# Altium footprint library Game_Controller.PcbLib: 19 footprints (part 1 of 2)
Each footprint in its own frame and in the unit in brackets; x right, y up, seen from the top. Pads: shape width x height; smd on the part's side, far side on the other; paste and mask are expansions set on the pad; w line width, h text height; cw(c..) or ccw(c..) is an arc to the next point about the centre after c.
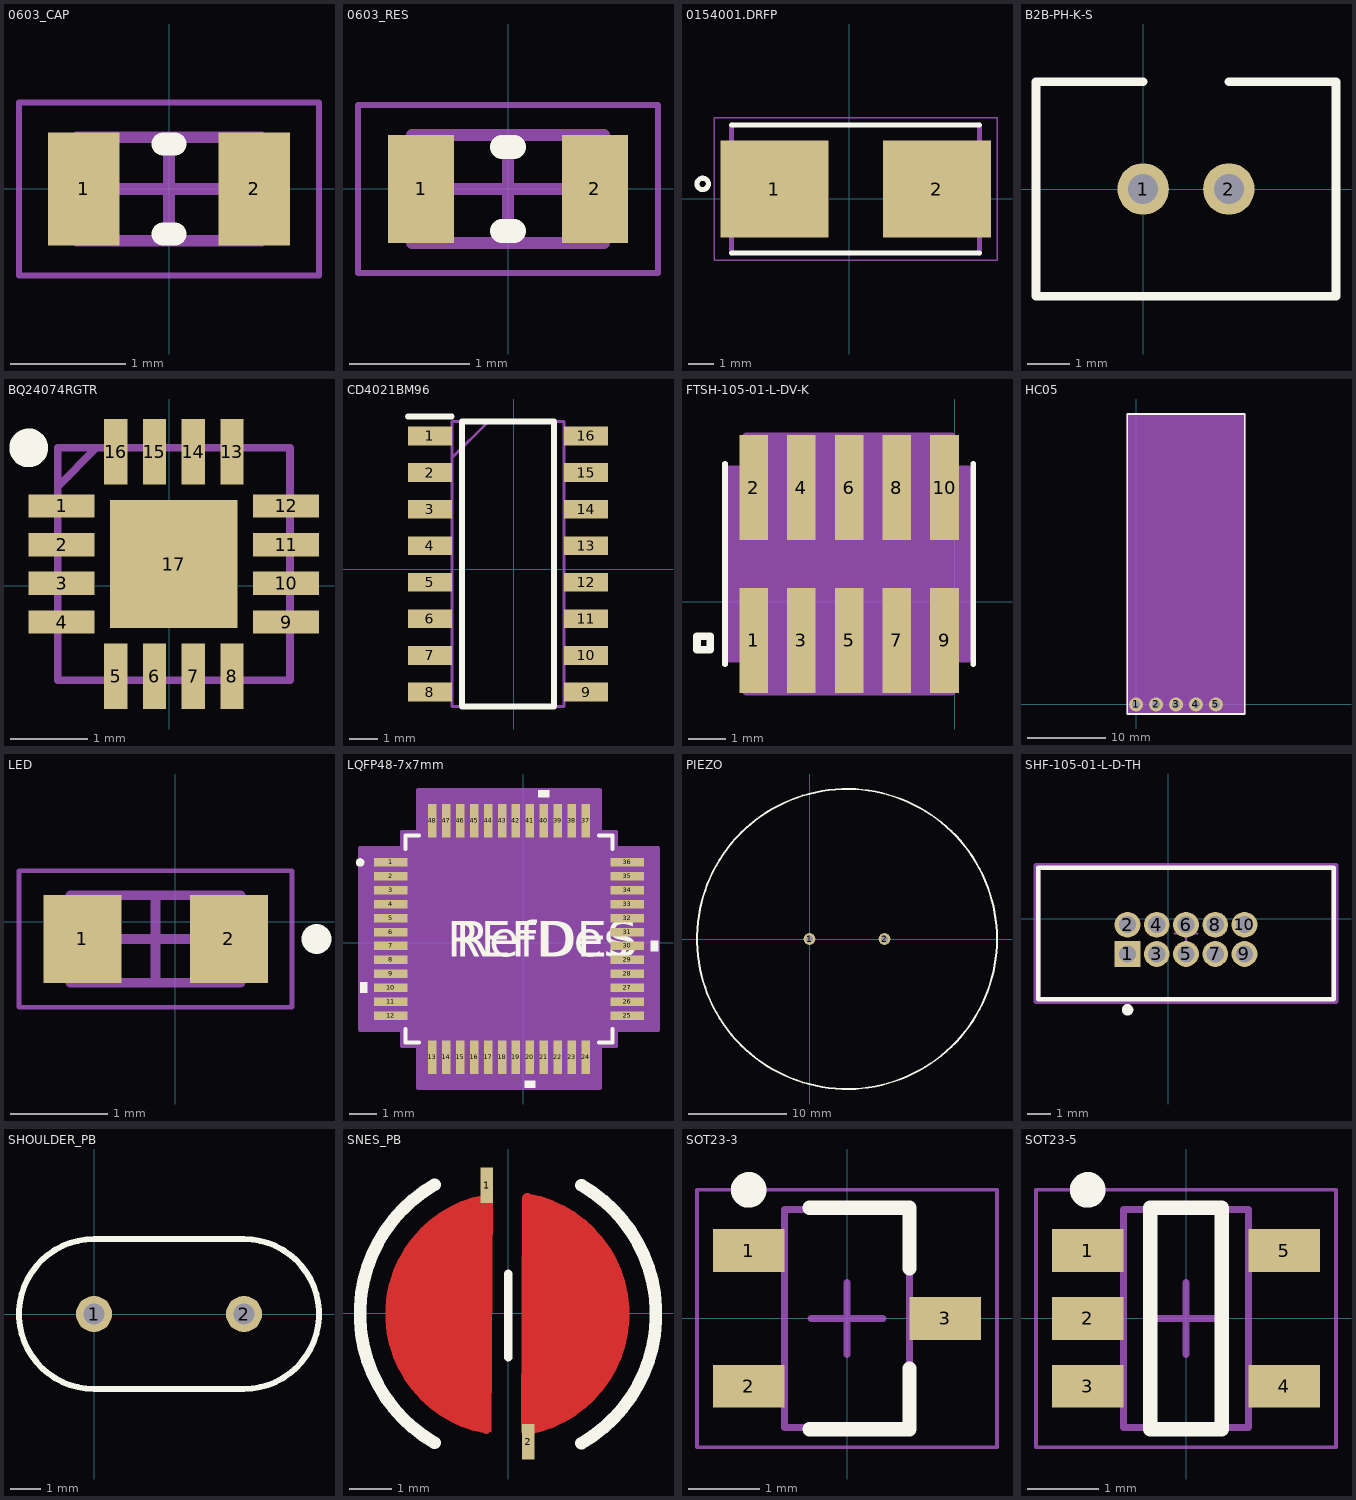
[diagram p0: the footprints below, top view; thin cyan lines are the x and y axes]

## 0603_CAP [mm] "Chip Capacitor, 2-Leads, Body 1.55x0.85mm, IPC Medium Density"
height 0.55
pads (2):
  rect 0.62x0.98 smd: 1(-0.74,0) 2(0.74,0)
Top Overlay:
  lines w0.2: -0.05,-0.39 0.05,-0.39 ; -0.05,0.39 0.05,0.39
Mechanical 13:
  lines w0.1: -0.8,-0.45 0.8,-0.45 0.8,0.45 -0.8,0.45 -0.8,-0.45
Mechanical 15:
  lines w0.05: -1.3,-0.75 1.3,-0.75 1.3,0.75 -1.3,0.75 -1.3,-0.75
  lines w0.1: -0.45,0 0.45,0 ; 0,-0.45 0,0.45
3D body: height 0.55, standoff 0, extent 0.6,-0.45 0.8,0.45
3D body: height 0.55, standoff 0, extent -0.8,-0.45 -0.6,0.45
3D body: height 0.55, standoff 0, extent -0.6,-0.45 0.6,0.45

## 0603_RES [mm] "Chip Resistor, 2-Leads, Body 1.55x0.85mm, IPC Medium Density"
height 0.55
pads (2):
  rect 0.55x0.9 smd: 1(-0.725,0) 2(0.725,0)
Top Overlay:
  lines w0.2: -0.05,-0.35 0.05,-0.35 ; -0.05,0.35 0.05,0.35
Mechanical 13:
  lines w0.1: -0.8,-0.45 0.8,-0.45 0.8,0.45 -0.8,0.45 -0.8,-0.45
Mechanical 15:
  lines w0.05: -1.25,-0.7 1.25,-0.7 1.25,0.7 -1.25,0.7 -1.25,-0.7
  lines w0.1: -0.45,0 0.45,0 ; 0,-0.45 0,0.45
3D body: height 0.55, standoff 0, extent 0.6,-0.45 0.8,0.45
3D body: height 0.55, standoff 0, extent -0.8,-0.45 -0.6,0.45
3D body: height 0.55, standoff 0, extent -0.6,-0.45 0.6,0.45

## 0154001.DRFP [mm]
pads (2):
  rect 4.24x3.81 smd: 1(-2.936,0.381) 2(3.444,0.381)
Top Overlay:
  circle w0.2: c-5.746,0.581 r0.224
  lines w0.2: -4.609,-2.134 5.117,-2.134 ; -4.609,2.896 5.117,2.896
Mechanical 13:
  lines w0.2: -4.609,-2.134 -4.609,2.896 ; 5.117,-2.134 5.117,2.896
Mechanical 15:
  lines w0.05: -5.296,-2.419 5.804,-2.419 5.804,3.181 -5.296,3.181 -5.296,-2.419
3D body "0154004.DR--3DModel-STEP-56544.STEP": height 3.81, standoff 0, extent -4.611,-2.134 5.119,2.896

## B2B-PH-K-S [mm]
pads (2):
  round 1.2 hole 0.7: 1(0,0) 2(2,0)
Top Overlay:
  lines w0.2: 0,2.5 -2.5,2.5 -2.5,-2.5 0,-2.5 2,-2.5 4.5,-2.5 4.5,2.5 2,2.5

## BQ24074RGTR [mm]
pads (17):
  rect 0.85x0.3 smd: 1(-1.389,1.033) 2(-1.389,0.533) 3(-1.389,0.033) 4(-1.389,-0.467) 9(1.511,-0.467) 10(1.511,0.033) 11(1.511,0.533) 12(1.511,1.033)
  rect 0.3x0.85 smd: 5(-0.689,-1.167) 6(-0.189,-1.167) 7(0.311,-1.167) 8(0.811,-1.167) 13(0.811,1.733) 14(0.311,1.733) 15(-0.189,1.733) 16(-0.689,1.733)
  rect 1.65x1.65 smd: 17(0.061,0.283)
Top Overlay:
  circle w0.25: c-1.814,1.783 r0.125
Mechanical 15:
  lines w0.1: -1.439,1.283 -0.939,1.783 ; -1.439,-1.217 -1.439,1.783 1.561,1.783 1.561,-1.217 -1.439,-1.217

## CD4021BM96 [mm]
pads (16):
  rect 1.525x0.65 smd: 1(-2.915,4.631) 2(-2.915,3.361) 3(-2.915,2.091) 4(-2.915,0.821) 5(-2.915,-0.449) 6(-2.915,-1.719) 7(-2.915,-2.989) 8(-2.915,-4.259) 9(2.509,-4.259) 10(2.509,-2.989) 11(2.509,-1.719) 12(2.509,-0.449) 13(2.509,0.821) 14(2.509,2.091) 15(2.509,3.361) 16(2.509,4.631)
Top Overlay:
  lines w0.2: -3.678,5.306 -2.153,5.306 ; -1.803,-4.764 -1.803,5.136 1.397,5.136 1.397,-4.764 -1.803,-4.764
Mechanical 15:
  lines w0.1: -2.153,3.866 -0.883,5.136 ; -2.153,-4.764 -2.153,5.136 1.747,5.136 1.747,-4.764 -2.153,-4.764

## FTSH-105-01-L-DV-K [mil]
pads (10):
  rect 30x110 smd paste+0 mask+0: 1(-210.62,-40.39) 2(-210.62,119.61) 3(-160.62,-40.39) 4(-160.62,119.61) 5(-110.62,-40.39) 6(-110.62,119.61) 7(-60.62,-40.39) 8(-60.62,119.61) 9(-10.62,-40.39) 10(-10.62,119.61)
Top Overlay:
  region: -5.62,-67.89 -15.62,-67.89 -15.62,-82.89 -5.62,-82.89
  lines w6: -240.62,-65.39 -240.62,144.61 ; 19.38,-65.39 19.38,144.61
  lines w7.87: -270,-50 -256.06,-50 -256.06,-36.06 -270,-36.06 -270,-50
  text ".Designator" at -310,210 h50
Mechanical 13:
  lines w1: -235.62,-60.39 14.38,-60.39 14.38,139.61 -235.62,139.61 -235.62,-60.39
  text ".Designator" at -310,210 h50
Mechanical 15:
  region: -218.62,-60.39 -235.62,-60.39 -235.62,139.61 -218.62,139.61 -218.62,174.61 -2.62,174.61 -2.62,139.61 14.38,139.61 14.38,-60.39 -2.62,-60.39 -2.62,-95.39 -218.62,-95.39
  region: 14.38,-60.39 -235.62,-60.39 -235.62,139.61 14.38,139.61
  lines w6: -235.62,-60.39 -235.62,139.61 -218.62,139.61 -218.62,174.61 -2.62,174.61 -2.62,139.61 14.38,139.61 14.38,-60.39 -2.62,-60.39 -2.62,-95.39 -218.62,-95.39 -218.62,-60.39 -235.62,-60.39
3D body "CON10_2X5_DUK_FTSH_SAI.step": height 235, standoff 0, extent -235.62,-83.38 14.38,162.6

## HC05 [mil]
pads (5):
  round 70 hole 40.16: 1(0,0) 2(100,0) 3(200,0) 4(300,0) 5(400,0)
Top Overlay:
  lines w7.87: -45.28,-48 545.28,-48 545.28,1456.69 -45.28,1456.69 -45.28,-48
Mechanical 13:
  lines w7.87: -45.28,-48 545.28,-48 545.28,1456.69 -45.28,1456.69 -45.28,-48
Mechanical 15:
  region: -45.28,1456.69 545.28,1456.69 545.28,-39.37 -45.28,-39.37
  lines w7.87: -45.28,-39.37 545.28,-39.37 545.28,1456.69 -45.28,1456.69 -45.28,-39.37

## LED [mm]
pads (2):
  rect 0.8x0.9 smd: 1(-0.954,-0.178) 2(0.548,-0.178)
Top Overlay:
  circle w0.254: c1.448,-0.178 r0.025
Mechanical 13:
  lines w0.1: -1.078,-0.628 0.672,-0.628 0.672,0.272 -1.078,0.272 -1.078,-0.628
Mechanical 15:
  lines w0.05: -1.604,-0.878 -1.604,0.522 1.198,0.522 1.198,-0.878 -1.604,-0.878
  lines w0.1: -0.653,-0.178 0.247,-0.178 ; -0.203,-0.628 -0.203,0.272
3D body "LTST-C191KGKT--3DModel-STEP-56544.STEP": height 0.55, standoff 0, extent -1.003,-0.578 0.597,0.222

## LQFP48-7x7mm [mil]
pads (48):
  rect 47x12 smd paste+0 mask+0: 1(-187.32,113.27) 2(-187.32,93.58) 3(-187.32,73.9) 4(-187.32,54.21) 5(-187.32,34.53) 6(-187.32,14.84) 7(-187.32,-4.84) 8(-187.32,-24.53) 9(-187.32,-44.21) 10(-187.32,-63.9) 11(-187.32,-83.58) 12(-187.32,-103.27) 25(147.32,-103.27) 26(147.32,-83.58) 27(147.32,-63.9) 28(147.32,-44.21) 29(147.32,-24.53) 30(147.32,-4.84) 31(147.32,14.84) 32(147.32,34.53) 33(147.32,54.21) 34(147.32,73.9) 35(147.32,93.58) 36(147.32,113.27)
  rect 12x47 smd paste+0 mask+0: 13(-128.27,-162.32) 14(-108.58,-162.32) 15(-88.9,-162.32) 16(-69.21,-162.32) 17(-49.53,-162.32) 18(-29.84,-162.32) 19(-10.16,-162.32) 20(9.53,-162.32) 21(29.21,-162.32) 22(48.9,-162.32) 23(68.58,-162.32) 24(88.27,-162.32) 37(88.27,172.32) 38(68.58,172.32) 39(48.9,172.32) 40(29.21,172.32) 41(9.53,172.32) 42(-10.16,172.32) 43(-29.84,172.32) 44(-49.53,172.32) 45(-69.21,172.32) 46(-88.9,172.32) 47(-108.58,172.32) 48(-128.27,172.32)
Top Overlay:
  circle w6: c-230.67,113.27 r3
  region: 36.71,205.82 21.71,205.82 21.71,215.82 36.71,215.82
  region: 180.82,2.66 190.82,2.66 190.82,-12.34 180.82,-12.34
  region: 17.03,-195.82 2.03,-195.82 2.03,-205.82 17.03,-205.82
  region: -220.82,-56.4 -230.82,-56.4 -230.82,-71.4 -220.82,-71.4
  lines w6: -166.5,-122.37 -166.5,-141.5 -147.37,-141.5 ; -166.5,132.37 -166.5,151.5 -147.37,151.5 ; 107.37,-141.5 126.5,-141.5 126.5,-122.37 ; 107.37,151.5 126.5,151.5 126.5,132.37
  text "REFDES" at -107.5,-20 h50
  text "RefDes" at -95,-20 h50
Mechanical 13:
  circle w0: c-138.82,113.27 r3
  lines w1: -161.5,96.5 -111.5,146.5 ; -161.5,-136.5 -161.5,146.5 121.5,146.5 121.5,-136.5 -161.5,-136.5
  text "RefDes2" at -107.5,-20 h50
Mechanical 15:
  region: -148.27,-146.5 -171.5,-146.5 -171.5,-123.27 -230.82,-123.27 -230.82,133.27 -171.5,133.27 -171.5,156.5 -148.27,156.5 -148.27,215.82 108.27,215.82 108.27,156.5 131.5,156.5 131.5,133.27 190.82,133.27 190.82,-123.27 131.5,-123.27 131.5,-146.5 108.27,-146.5 108.27,-205.82 -148.27,-205.82
  lines w6: -230.82,-123.27 -230.82,133.27 -171.5,133.27 -171.5,156.5 -148.27,156.5 -148.27,215.82 108.27,215.82 108.27,156.5 131.5,156.5 131.5,133.27 190.82,133.27 190.82,-123.27 131.5,-123.27 131.5,-146.5 108.27,-146.5 108.27,-205.82 -148.27,-205.82 -148.27,-146.5 -171.5,-146.5 -171.5,-123.27 -230.82,-123.27
3D body "LQFP48-7x7mm.step": height 63.11, standoff 0, extent -197.05,-172.05 157.05,182.05

## PIEZO [mm]
pads (2):
  round 1.2 hole 0.7: 1(0,0) 2(7.6,0)
Top Overlay:
  circle w0.2: c3.8,0 r15.2

## SHF-105-01-L-D-TH [mm]
pads (10):
  rect 1.12x1.12 hole 0.74 paste-2539.97 mask+0: 1(-1.778,-1.525)
  round 1.12 hole 0.74 paste-2539.97 mask+0: 2(-1.778,-0.255) 3(-0.508,-1.525) 4(-0.508,-0.255) 5(0.762,-1.525) 6(0.762,-0.255) 7(2.032,-1.525) 8(2.032,-0.255) 9(3.302,-1.525) 10(3.302,-0.255)
Top Overlay:
  circle w0.25: c-1.778,-3.95 r0.125
  lines w0.2: -5.653,-3.495 7.177,-3.495 7.177,2.225 -5.653,2.225 -5.653,-3.495
Top 3D Body:
  lines w0.2: -5.653,-3.495 7.177,-3.495 7.177,2.225 -5.653,2.225 -5.653,-3.495
Board:
  lines w0.2: -5.753,-3.595 7.277,-3.595 7.277,2.325 -5.753,2.325 -5.753,-3.595
Top Assembly:
  lines w0.2: -5.753,-3.595 7.277,-3.595 7.277,2.325 -5.753,2.325 -5.753,-3.595
  text ".Designator" at 0.762,-0.448 h1
Top Component Center:
  lines w0.1: 0.262,-0.635 1.262,-0.635 ; 0.762,-1.135 0.762,-0.135
3D body "Conn_Samtec_SHF-105-01-L-D-TH_eec.STEP": height 5.46, standoff -1.91, extent -5.588,-3.43 7.112,2.159

## SHOULDER_PB [mm]
pads (2):
  round 1.2 hole 0.7: 1(0,0) 2(5,0)
Top Overlay:
  lines w0.2: 0,-2.5 cw(c0,0) 0,2.5 5,2.5 cw(c5,0) 5,-2.5 0,-2.5

## SNES_PB [mm]
pads (2):
  rect 0.3x0.85 smd: 1(-0.514,3.05) 2(0.477,-3.071)
Top Layer:
  region: -0.401,-2.841 -1.321,-2.509 -2.197,-1.839 -2.743,-0.722 -2.826,0.143 -2.708,0.872 -2.173,1.803 -1.733,2.2 -0.373,2.797
  region: 0.338,2.762 1.233,2.438 2.109,1.768 2.655,0.652 2.738,-0.214 2.62,-0.942 2.085,-1.874 1.645,-2.271 0.31,-2.857
  lines w0.203: -0.518,-2.781 cw(c-0.031,-0.023) -0.518,2.734
  lines w0.254: 0.455,-2.781 ccw(c-0.031,-0.023) 0.455,2.734
Top Overlay:
  lines w0.2: 0,-1.06 0,0.94
  lines w0.3: -1.759,-3.097 cw(c0.019,-0.017) -1.759,3.062 ; 1.751,-3.107 ccw(c-0.027,-0.028) 1.751,3.052
Top Solder:
  region: -0.518,2.734 -1.953,2.002 -2.603,1.135 -2.826,0.143 -2.658,-0.995 -2.008,-2.006 -1.321,-2.509 -0.544,-2.789 -0.518,-2.781 0.428,-2.789 1.731,-2.185 2.353,-1.408 2.679,-0.578 2.696,0.219 2.655,0.652 2.382,1.21 2.109,1.768 1.671,2.103 0.989,2.565 0.455,2.734
  lines w0.508: -0.544,-2.789 cw(c-0.058,-0.032) -0.544,2.725 ; 0.428,-2.789 ccw(c-0.058,-0.032) 0.428,2.725

## SOT23-3 [mm] "SOT23, 3-Leads, Body 2.90x2.80mm, Pitch 0.95mm, IPC Medium Density"
height 1.45
pads (3):
  rect 1x0.6 smd: 1(-1.375,0.95) 2(-1.375,-0.95) 3(1.375,0)
Top Overlay:
  circle w0.25: c-1.375,1.8 r0.125
  lines w0.2: -0.525,-1.55 0.875,-1.55 0.875,-0.7 ; -0.525,1.55 0.875,1.55 0.875,0.7
Top Courtyard:
  lines w0.05: -2.1,-1.8 2.1,-1.8 2.1,1.8 -2.1,1.8 -2.1,-1.8
  lines w0.1: -0.5,0 0.5,0 ; 0,-0.5 0,0.5
Top Assembly:
  lines w0.1: -0.875,-1.525 0.875,-1.525 0.875,1.525 -0.875,1.525 -0.875,-1.525
3D body: height 1.45, standoff 0.05, extent -0.875,-1.525 0.875,1.525

## SOT23-5 [mm] "SOT23, 5-Leads, Body 2.90x2.80mm, Pitch 0.95mm, IPC Medium Density"
height 1.45
pads (5):
  rect 1x0.6 smd: 1(-1.375,0.95) 2(-1.375,0) 3(-1.375,-0.95) 4(1.375,-0.95) 5(1.375,0.95)
Top Overlay:
  circle w0.25: c-1.375,1.8 r0.125
  lines w0.2: -0.5,-1.55 0.5,-1.55 0.5,1.55 -0.5,1.55 -0.5,-1.55
Mechanical 13:
  lines w0.1: -0.875,-1.525 -0.875,1.525 0.875,1.525 0.875,-1.525 -0.875,-1.525
Mechanical 15:
  lines w0.05: -2.1,-1.8 -2.1,1.8 2.1,1.8 2.1,-1.8 -2.1,-1.8
  lines w0.1: -0.5,0 0.5,0 ; 0,-0.5 0,0.5
3D body: height 1.45, standoff 0.05, extent -0.875,-1.525 0.875,1.525